# Altium schematic symbol library TLV2372IDR.SchLib: 1 symbol
Pins are listed as number, name and electrical type; pins without a type are passive.

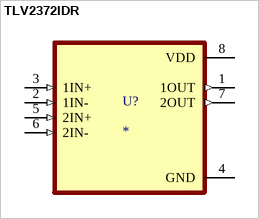
[diagram p0: symbol TLV2372IDR]

## TLV2372IDR
designator U?
Dual, 16-V, 3-MHz, RRIO operational amplifier; MF: Texas Instruments; MP: TLV2372IDR; SnapEDA_Link: https://www.snapeda.com/parts/TLV2372IDR/Texas+Instruments/view-part/?ref=snap; Package: SOIC-8 Texas Instruments; Value: *; Check_prices: https://www.snapeda.com/parts/TLV2372IDR/Texas+Instruments/view-part/?ref=eda
footprint SOIC127P599X175-8N
pins: 1 1OUT (out), 2 1IN- (in), 3 1IN+ (in), 4 GND (power), 5 2IN+ (in), 6 2IN- (in), 7 2OUT (out), 8 VDD (power)